# Altium footprint library SH.PcbLib: 14 footprints
Each footprint in its own frame and in the unit in brackets; x right, y up, seen from the top. Pads: shape width x height; smd on the part's side, far side on the other; paste and mask are expansions set on the pad; w line width, h text height; cw(c..) or ccw(c..) is an arc to the next point about the centre after c.
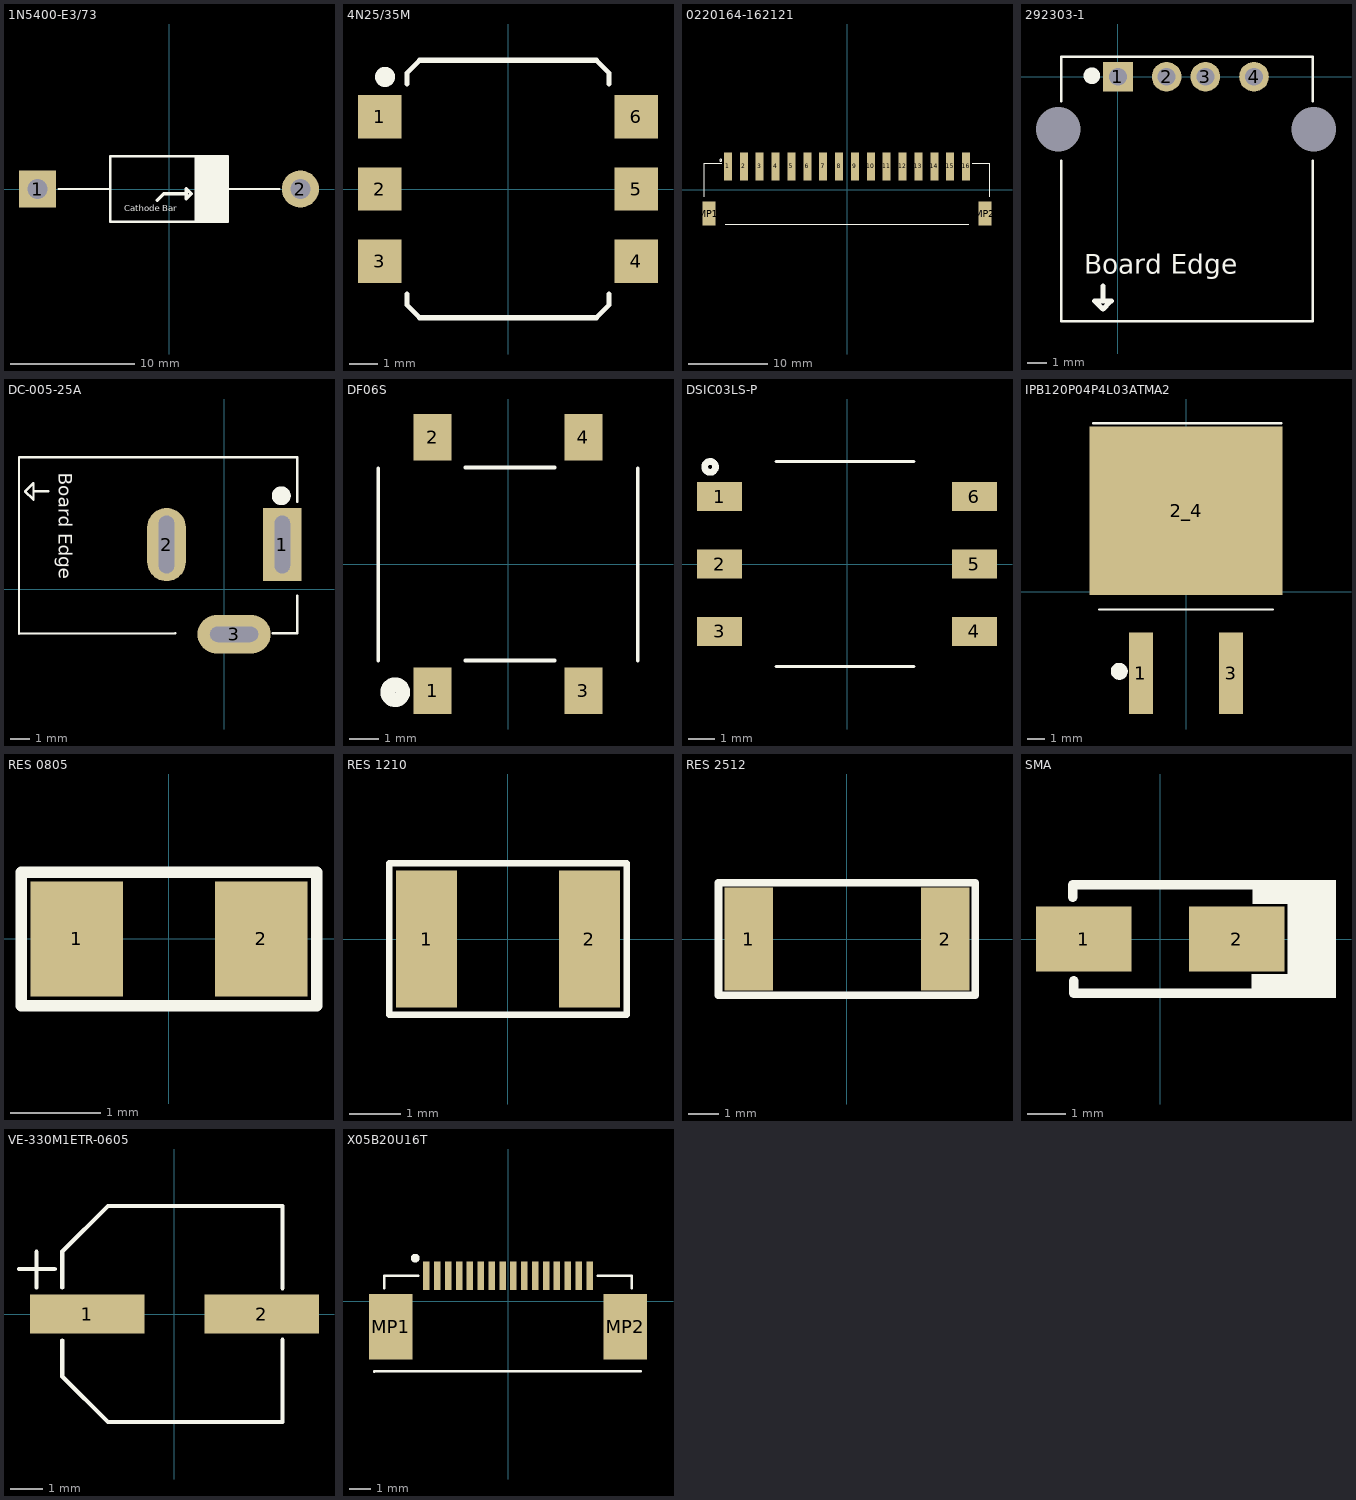
[diagram p0: the footprints below, top view; thin cyan lines are the x and y axes]

## 1N5400-E3/73 [mm]
pads (2):
  rect 3x3 hole 1.6: 1(-10.6,0)
  round 3 hole 1.6: 2(10.6,0)
Top Overlay:
  rectangle: 2.057,-2.616 4.75,2.65
  lines w0.2: -8.89,0 -4.8,0 ; 4.8,0 8.89,0 ; -4.75,-2.65 4.75,-2.65 4.75,2.65 -4.75,2.65 -4.75,-2.65
  lines w0.254: -0.953,-0.902 -0.432,-0.381 0.178,-0.381 1.397,-0.381 ; 1.397,-0.381 1.397,0.025 1.803,-0.381 1.397,-0.787 1.397,-0.381
  text "Cathode Bar" at -3.607,-1.803 h0.5

## 4N25/35M [mm] "OPTOISO 4.17KV TRANS W/BASE 6SMD"
height 5
pads (6):
  rect 1.52x1.525 smd: 1(-4.505,2.54) 2(-4.505,0) 3(-4.505,-2.54) 4(4.505,-2.54) 5(4.505,0) 6(4.505,2.54)
Top Overlay:
  circle w0.5: c-4.318,3.937 r0.102
  lines w0.178: -3.54,-3.683 -3.54,-4.08 -3.099,-4.521 ; -3.54,3.683 -3.54,4.08 -3.099,4.521 ; 3.099,-4.521 3.54,-4.08 3.54,-3.683 ; 3.099,4.521 3.54,4.08 3.54,3.683
  lines w0.2: -3.099,-4.521 3.099,-4.521 ; -3.099,4.521 3.099,4.521
3D body "User Library-FAIRCHILD N06C_SMDIP-6.step": height 5.08, standoff 0, extent -4.95,-4.445 4.95,4.445

## 0220164-162121 [mm]
pads (18):
  rect 1x3.5 smd: 1(-15,2.975) 2(-13,2.975) 3(-11,2.975) 4(-9,2.975) 5(-7,2.975) 6(-5,2.975) 7(-3,2.975) 8(-1,2.975) 9(1,2.975) 10(3,2.975) 11(5,2.975) 12(7,2.975) 13(9,2.975) 14(11,2.975) 15(13,2.975) 16(15,2.975)
  rect 1.6x3 smd: MP1(-17.4,-2.975) MP2(17.4,-2.975)
Top Overlay:
  circle w0.127: c-15.9,3.759 r0.127
  lines w0.127: -18,-0.838 -18,3.353 -15.799,3.353 ; -15.363,-4.347 0,-4.347 15.363,-4.347 ; 15.799,3.353 18,3.353 18,-0.838

## 292303-1 [mm] "USB-A (USB TYPE-A) USB 2.0 Receptacle Connector 4 Position Through Hole, Right Angle"
pads (6):
  rect 1.524x1.524 hole 0.92: 1(0,0)
  round 1.524 hole 0.92: 2(2.5,0) 3(4.5,0) 4(7,0)
  round 0 hole 2.3 unplated: MH1(-3.07,-2.71) MH2(10.07,-2.71)
Top Overlay:
  circle w0.5: c-1.346,0.051 r0.18
  lines w0.127: -2.921,-4.318 -2.921,-12.573 10.033,-12.573 10.033,-4.318 ; -2.921,-1.27 -2.921,1.016 10.033,1.016 10.033,-1.27
  lines w0.254: -0.775,-10.77 -0.775,-11.532 ; -0.368,-11.557 -0.775,-11.963 -1.206,-11.532 -0.775,-11.532 ; -0.343,-11.532 -0.775,-11.532
  text "Board Edge" at -1.727,-10.132 h1
3D body "292303-1--3DModel-STEP-56544.STEP": height 7.71, standoff -3.77, extent -4.444,-13.022 11.556,0.978

## DC-005-25A [mm]
pads (3):
  rect 2x3.8 hole 0.8 slot 3 at 90 deg: 1(3,2.325)
  oval 2x3.8 hole 0.8 slot 3 at 90 deg: 2(-3,2.325)
  oval 3.8x2 hole 0.8 slot 2.5 at 0 deg: 3(0.5,-2.325)
Top Overlay:
  circle w0.5: c2.946,4.851 r0.241
  lines w0.127: -10.643,-2.286 -2.537,-2.272 ; -10.643,-2.272 -10.643,6.858 3.756,6.858 3.759,6.855 ; -9.916,4.675 -10.322,5.081 -9.89,5.513 -9.89,5.081 ; -9.89,4.649 -9.89,5.081 ; -9.128,5.081 -9.89,5.081 ; 2.515,-2.272 3.762,-2.272 3.762,-0.317 ; 3.762,4.535 3.762,6.855
  text "Board Edge" at -8.59,6.033 h0.7
3D body "DC-005.STEP": height 11, standoff -4.4, extent -10.592,-2.54 3.708,6.86

## DF06S [mm]
pads (4):
  rect 1.3x1.6 smd: 1(-2.6,-4.37) 2(-2.6,4.37) 3(2.6,-4.37) 4(2.6,4.37)
Top Overlay:
  circle w0.5: c-3.886,-4.42 r0.262
  lines w0.127: -4.47,-3.327 -4.47,3.302 ; -1.473,-3.327 1.6,-3.327 ; -1.473,3.327 1.6,3.327 ; 4.47,-3.327 4.47,3.302
3D body "User Library-Bridge rectifier DFS package-1.step": height 3.02, standoff 0, extent -4.4,-4.985 4.4,4.985

## DSIC03LS-P [mm]
pads (6):
  rect 1.7x1.1 smd: 1(-4.8,2.54) 2(-4.8,0) 3(-4.8,-2.54) 4(4.8,-2.54) 5(4.8,0) 6(4.8,2.54)
Top Overlay:
  circle w0.254: c-5.156,3.658 r0.205
  lines w0.127: -2.667,-3.861 2.515,-3.861 ; -2.667,3.861 2.515,3.861
3D body "dsic03ls-p.stp": height 4.15, standoff 0, extent -4.88,-3.81 4.88,3.81

## IPB120P04P4L03ATMA2 [mm] "MOSFET P-CH 40V 120A TO263-3"
pads (3):
  rect 1.35x4.6 smd: 1(-2.54,-4.575) 3(2.54,-4.575)
  rect 10.9x9.5 smd: 2_4(0,4.575)
Top Overlay:
  circle w0.5: c-3.759,-4.468 r0.229
  lines w0.127: -5.232,9.5 5.359,9.5 ; -4.902,-0.991 4.902,-0.991
3D body "Infineon-STP_PG-TO263-3-2-P-v01_00-EN.stp": height 4.51, standoff 0, extent -5,-5.849 5,9.101

## RES 0805 [mil] "SMD 0805"
pads (2):
  rect 40x50 smd: 1(-40,0) 2(40,0)
Top Overlay:
  lines w5: -64,-29 64,-29 64,29 -64,29 -64,-29
3D body "User Library-CR2012-0805.STEP": height 23.62, standoff 0, extent -39.34,-24.75 39.4,24.46

## RES 1210 [mm] "560 OHM"
pads (2):
  rect 1.2x2.7 smd: 1(-1.6,0) 2(1.6,0)
Top Overlay:
  lines w0.127: -2.336,-1.492 -2.336,1.492 2.337,1.492 2.337,-1.492 -2.336,-1.492
3D body "User Library-R_1210.step": height 0.6, standoff 0, extent -1.6,-1.25 1.6,1.25

## RES 2512 [mm] "0.033O ±1% 2W ±1800ppm/°C 2512 Low Resistors & Current Sense Resistors - Surface Mount RoHS"
pads (2):
  rect 1.6x3.4 smd: 1(-3.25,0) 2(3.25,0)
Top Overlay:
  lines w0.254: -4.242,-1.854 -4.242,1.854 4.237,1.854 4.237,-1.854 -4.242,-1.854
3D body "CircuitWorks-RESISTOR 2512.step": height 0.58, standoff -0.03, extent -3.175,-1.63 3.175,1.63

## SMA [mm] "DIODE GEN PURP 50V 1A SMA"
pads (2):
  rect 2.5x1.7 smd: 1(-2,0) 2(2,0)
Top Overlay:
  region: 4.394,-0.914 2.388,-0.914 2.388,-1.549 4.394,-1.549
  region: 4.597,1.549 3.327,1.549 3.327,-1.549 4.597,-1.549
  region: 4.394,1.549 2.413,1.549 2.413,0.914 4.394,0.914
  lines w0.254: -2.286,1.092 -2.286,1.422 2.388,1.422 ; -2.261,-1.092 -2.261,-1.422 2.413,-1.422
3D body "User Library-DO-214AC SMA.step": height 1, standoff -1.4, extent -2.6,-1.3 2.6,1.3

## VE-330M1ETR-0605 [mm]
pads (2):
  rect 3.5x1.2 smd: 1(-2.67,0) 2(2.67,0)
Top Overlay:
  lines w0.127: -4.75,1.372 -3.656,1.372 ; -4.216,0.811 -4.216,1.905 ; -3.427,-0.813 -3.427,-1.907 -2.034,-3.3 3.3,-3.3 3.3,-0.787 ; -3.427,0.813 -3.427,1.907 -2.034,3.3 3.3,3.3 3.3,0.787

## X05B20U16T [mm]
pads (18):
  rect 0.3x1.3 smd: 1(-3.75,1.175) 2(-3.25,1.175) 3(-2.75,1.175) 4(-2.25,1.175) 5(-1.75,1.175) 6(-1.25,1.175) 7(-0.75,1.175) 8(-0.25,1.175) 9(0.25,1.175) 10(0.75,1.175) 11(1.25,1.175) 12(1.75,1.175) 13(2.25,1.175) 14(2.75,1.175) 15(3.25,1.175) 16(3.75,1.175)
  rect 2x3 smd: MP1(-5.4,-1.175) MP2(5.4,-1.175)
Top Overlay:
  circle w0.254: c-4.267,1.981 r0.072
  lines w0.127: -6.153,-3.232 6.096,-3.226 ; -5.69,0.61 -5.69,1.168 -4.14,1.168 ; 4.14,1.168 5.69,1.168 5.69,0.61